# Altium footprint library SS36.PcbLib: 1 footprints
Each footprint in its own frame and in the unit in brackets; x right, y up, seen from the top. Pads: shape width x height; smd on the part's side, far side on the other; paste and mask are expansions set on the pad; w line width, h text height; cw(c..) or ccw(c..) is an arc to the next point about the centre after c.
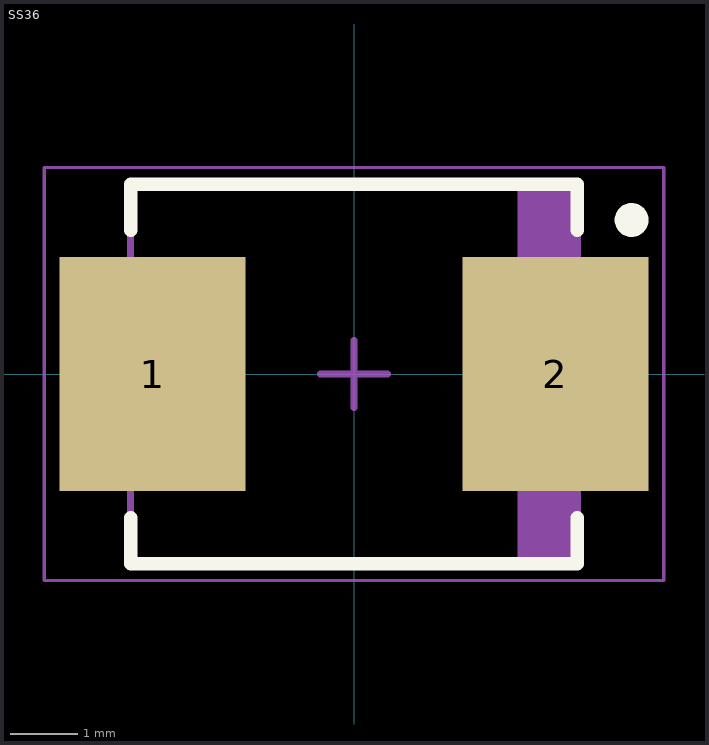
[diagram p0: the footprint, top view; thin cyan lines are the x and y axes]

## SS36 [mm] "Molded Diode, 2-Leads"
height 2.06
pads (2):
  rect 2.75x3.45 smd: 1(-2.975,0) 2(2.975,0)
Top Overlay:
  circle w0.25: c4.1,2.275 r0.125
  lines w0.2: -3.3,-2.125 -3.3,-2.8 3.3,-2.8 3.3,-2.125 ; -3.3,2.125 -3.3,2.8 3.3,2.8 3.3,2.125
Mechanical 13:
  rectangle: 2.412,-2.795 3.3,2.795
  lines w0.1: -3.3,-2.795 3.3,-2.795 3.3,2.795 -3.3,2.795 -3.3,-2.795
Mechanical 15:
  lines w0.05: -4.575,-3.05 4.575,-3.05 4.575,3.05 -4.575,3.05 -4.575,-3.05
  lines w0.1: -0.5,0 0.5,0 ; 0,-0.5 0,0.5
3D body "DIOM6959X21N.step": height 2.06, standoff 0, extent -3.52,-2.795 3.52,2.795